# Altium integrated library RC0402FR-070RL.IntLib: 1 symbol
Pins are listed as number, name and electrical type; pins without a type are passive.

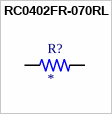
[diagram p0: symbol RC0402FR-070RL]

## RC0402FR-070RL
designator R?
0 Ohms Jumper 0.063W, 1/16W Chip Resistor 0402 (1005 Metric) Moisture Resistant Thick Film; MF: Yageo; MP: RC0402FR-070RL; SnapEDA_Link: https://www.snapeda.com/parts/RC0402FR-070RL/Yageo/view-part/?ref=snap; Package: 0402 Yageo; Value: *; Check_prices: https://www.snapeda.com/parts/RC0402FR-070RL/Yageo/view-part/?ref=eda
footprint CAPC1005X60
pins: 1, 2